# Altium footprint library 2019-09-13_04-08-47.PcbLib: 3 footprints
Each footprint in its own frame and in the unit in brackets; x right, y up, seen from the top. Pads: shape width x height; smd on the part's side, far side on the other; paste and mask are expansions set on the pad; w line width, h text height; cw(c..) or ccw(c..) is an arc to the next point about the centre after c.
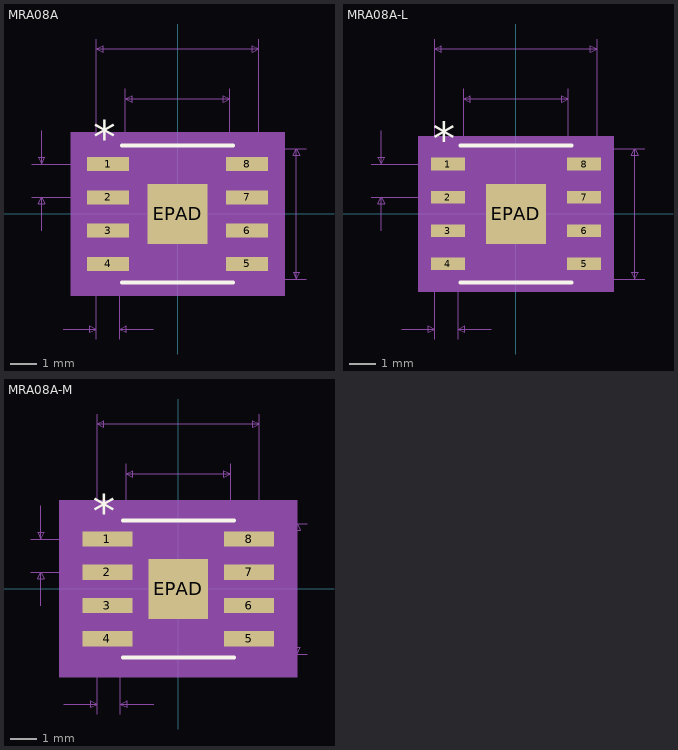
[diagram p0: the footprints below, top view; thin cyan lines are the x and y axes]

## MRA08A [mil]
pads (9):
  rect 63x21 smd paste+0 mask+0: 1(-104.5,75) 2(-104.5,25) 3(-104.5,-25) 4(-104.5,-75) 5(104.5,-75) 6(104.5,-25) 7(104.5,25) 8(104.5,75)
  rect 90x90 smd paste-44.5 mask+0: EPAD(0,0)
Top Overlay:
  lines w6: -83.5,-103 83.5,-103 ; -83.5,103 83.5,103
  text "*" at -127,91 h50
Top Paste:
  region: 45,45 -45,45 -45,-45 45,-45
Mechanical 5:
  region: 161,-123 -161,-123 -161,123 161,123
Mechanical 7:
  lines w1: -219.5,25 -104.5,25 ; -219.5,75 -104.5,75 ; -204.5,-25 -204.5,25 ; -204.5,125 -204.5,75 ; -172,-173 -122,-173 ; -122,-188 -122,0 -122,263 ; -87,-188 -87,0 ; -78.5,0 -78.5,188 ; -37,-173 -87,-173 ; 0,-98 193.5,-98 ; 0,98 193.5,98 ; 78.5,0 78.5,188 ; 122,0 122,263 ; -204.5,25 -199.5,15 -209.5,15 -204.5,25 ; -204.5,75 -199.5,85 -209.5,85 -204.5,75 ; -122,-173 -132,-178 -132,-168 -122,-173 ; -122,248 -112,243 -112,253 -122,248 ; -122,248 122,248 ; -87,-173 -77,-178 -77,-168 -87,-173 ; -78.5,173 -68.5,168 -68.5,178 -78.5,173 ; -78.5,173 78.5,173 ; 78.5,173 68.5,168 68.5,178 78.5,173 ; 122,248 112,243 112,253 122,248 ; 178.5,-98 183.5,-88 173.5,-88 178.5,-98 ; 178.5,-98 178.5,98 ; 178.5,98 183.5,88 173.5,88 178.5,98
  text "0.035in/0.889mm" at -198.25,-218 h25
  text "0.05in/1.27mm" at -387,37.5 h25
  text "0.196in/4.978mm" at 198.5,-12.5 h25
  text "0.244in/6.198mm" at -93.75,268 h25
  text "0.157in/3.988mm" at -93.75,193 h25
  text "Alt 2 Padstyle: OX90Y60D30P" at -337.5,-598 h50
  text "Alt 1 Padstyle: OX60Y90D30P" at -337.5,-538 h50
  text "Heat Tab Padstyle: RX90Y90D0T" at -362.5,-418 h50
  text "Pin One Padstyle: RX63Y21D0T" at -350,-358 h50
  text "Default Padstyle: RX63Y21D0T" at -350,-298 h50
Mechanical 13:
  lines w0: -12,98 ccw(c0,98) 12,98
  lines w1: -122,-84.5 -78.5,-84.5 -78.5,-65.5 -122,-65.5 -122,-84.5 ; -122,-34.5 -78.5,-34.5 -78.5,-15.5 -122,-15.5 -122,-34.5 ; -122,15.5 -78.5,15.5 -78.5,34.5 -122,34.5 -122,15.5 ; -122,65.5 -78.5,65.5 -78.5,84.5 -122,84.5 -122,65.5 ; -78.5,-98 -78.5,98 78.5,98 78.5,-98 -78.5,-98 ; 78.5,-84.5 122,-84.5 122,-65.5 78.5,-65.5 78.5,-84.5 ; 78.5,-34.5 122,-34.5 122,-15.5 78.5,-15.5 78.5,-34.5 ; 78.5,15.5 122,15.5 122,34.5 78.5,34.5 78.5,15.5 ; 78.5,65.5 122,65.5 122,84.5 78.5,84.5 78.5,65.5
  text "*" at -76,45 h50
Mechanical 15:
  region: -88.5,-95.5 -146,-95.5 -146,95.5 -88.5,95.5 -88.5,108 88.5,108 88.5,95.5 146,95.5 146,-95.5 88.5,-95.5 88.5,-108 -88.5,-108
  lines w6: -146,-95.5 -88.5,-95.5 -88.5,-108 88.5,-108 88.5,-95.5 146,-95.5 146,95.5 88.5,95.5 88.5,108 -88.5,108 -88.5,95.5 -146,95.5 -146,-95.5
3D body: height 10, standoff 0, extent 0,0 10,10

## MRA08A-L [mil]
pads (9):
  rect 51x19 smd paste+0 mask+0: 1(-102.5,75) 2(-102.5,25) 3(-102.5,-25) 4(-102.5,-75) 5(102.5,-75) 6(102.5,-25) 7(102.5,25) 8(102.5,75)
  rect 90x90 smd paste-44.5 mask+0: EPAD(0,0)
Top Overlay:
  lines w6: -83.5,-103 83.5,-103 ; -83.5,103 83.5,103
  text "*" at -125,89 h50
Top Paste:
  region: 45,45 -45,45 -45,-45 45,-45
Mechanical 5:
  region: 147,-117 -147,-117 -147,117 147,117
Mechanical 7:
  lines w1: -217.5,25 -102.5,25 ; -217.5,75 -102.5,75 ; -202.5,-25 -202.5,25 ; -202.5,125 -202.5,75 ; -172,-173 -122,-173 ; -122,-188 -122,0 -122,263 ; -87,-188 -87,0 ; -78.5,0 -78.5,188 ; -37,-173 -87,-173 ; 0,-98 193.5,-98 ; 0,98 193.5,98 ; 78.5,0 78.5,188 ; 122,0 122,263 ; -202.5,25 -197.5,15 -207.5,15 -202.5,25 ; -202.5,75 -197.5,85 -207.5,85 -202.5,75 ; -122,-173 -132,-178 -132,-168 -122,-173 ; -122,248 -112,243 -112,253 -122,248 ; -122,248 122,248 ; -87,-173 -77,-178 -77,-168 -87,-173 ; -78.5,173 -68.5,168 -68.5,178 -78.5,173 ; -78.5,173 78.5,173 ; 78.5,173 68.5,168 68.5,178 78.5,173 ; 122,248 112,243 112,253 122,248 ; 178.5,-98 183.5,-88 173.5,-88 178.5,-98 ; 178.5,-98 178.5,98 ; 178.5,98 183.5,88 173.5,88 178.5,98
  text "0.035in/0.889mm" at -198.25,-218 h25
  text "0.05in/1.27mm" at -385,37.5 h25
  text "0.196in/4.978mm" at 198.5,-12.5 h25
  text "0.244in/6.198mm" at -93.75,268 h25
  text "0.157in/3.988mm" at -93.75,193 h25
  text "Alt 2 Padstyle: OX90Y60D30P" at -337.5,-598 h50
  text "Alt 1 Padstyle: OX60Y90D30P" at -337.5,-538 h50
  text "Heat Tab Padstyle: RX90Y90D0T" at -362.5,-418 h50
  text "Pin One Padstyle: RX51Y19D0T" at -350,-358 h50
  text "Default Padstyle: RX51Y19D0T" at -350,-298 h50
Mechanical 13:
  lines w0: -12,98 ccw(c0,98) 12,98
  lines w1: -122,-84.5 -78.5,-84.5 -78.5,-65.5 -122,-65.5 -122,-84.5 ; -122,-34.5 -78.5,-34.5 -78.5,-15.5 -122,-15.5 -122,-34.5 ; -122,15.5 -78.5,15.5 -78.5,34.5 -122,34.5 -122,15.5 ; -122,65.5 -78.5,65.5 -78.5,84.5 -122,84.5 -122,65.5 ; -78.5,-98 -78.5,98 78.5,98 78.5,-98 -78.5,-98 ; 78.5,-84.5 122,-84.5 122,-65.5 78.5,-65.5 78.5,-84.5 ; 78.5,-34.5 122,-34.5 122,-15.5 78.5,-15.5 78.5,-34.5 ; 78.5,15.5 122,15.5 122,34.5 78.5,34.5 78.5,15.5 ; 78.5,65.5 122,65.5 122,84.5 78.5,84.5 78.5,65.5
  text "*" at -76,45 h50
Mechanical 15:
  region: -82.5,-88.5 -132,-88.5 -132,88.5 -82.5,88.5 -82.5,102 82.5,102 82.5,88.5 132,88.5 132,-88.5 82.5,-88.5 82.5,-102 -82.5,-102
  lines w6: -132,-88.5 -82.5,-88.5 -82.5,-102 82.5,-102 82.5,-88.5 132,-88.5 132,88.5 82.5,88.5 82.5,102 -82.5,102 -82.5,88.5 -132,88.5 -132,-88.5
3D body: height 10, standoff 0, extent 0,0 10,10

## MRA08A-M [mil]
pads (9):
  rect 75x23 smd paste+0 mask+0: 1(-106.5,75) 2(-106.5,25) 3(-106.5,-25) 4(-106.5,-75) 5(106.5,-75) 6(106.5,-25) 7(106.5,25) 8(106.5,75)
  rect 90x90 smd paste-44.5 mask+0: EPAD(0,0)
Top Overlay:
  lines w6: -83.5,-103 83.5,-103 ; -83.5,103 83.5,103
  text "*" at -129,93 h50
Top Paste:
  region: 45,45 -45,45 -45,-45 45,-45
Mechanical 5:
  region: 179,-133 -179,-133 -179,133 179,133
Mechanical 7:
  lines w1: -221.5,25 -106.5,25 ; -221.5,75 -106.5,75 ; -206.5,-25 -206.5,25 ; -206.5,125 -206.5,75 ; -172,-173 -122,-173 ; -122,-188 -122,0 -122,263 ; -87,-188 -87,0 ; -78.5,0 -78.5,188 ; -37,-173 -87,-173 ; 0,-98 193.5,-98 ; 0,98 193.5,98 ; 78.5,0 78.5,188 ; 122,0 122,263 ; -206.5,25 -201.5,15 -211.5,15 -206.5,25 ; -206.5,75 -201.5,85 -211.5,85 -206.5,75 ; -122,-173 -132,-178 -132,-168 -122,-173 ; -122,248 -112,243 -112,253 -122,248 ; -122,248 122,248 ; -87,-173 -77,-178 -77,-168 -87,-173 ; -78.5,173 -68.5,168 -68.5,178 -78.5,173 ; -78.5,173 78.5,173 ; 78.5,173 68.5,168 68.5,178 78.5,173 ; 122,248 112,243 112,253 122,248 ; 178.5,-98 183.5,-88 173.5,-88 178.5,-98 ; 178.5,-98 178.5,98 ; 178.5,98 183.5,88 173.5,88 178.5,98
  text "0.035in/0.889mm" at -198.25,-218 h25
  text "0.05in/1.27mm" at -389,37.5 h25
  text "0.196in/4.978mm" at 198.5,-12.5 h25
  text "0.244in/6.198mm" at -93.75,268 h25
  text "0.157in/3.988mm" at -93.75,193 h25
  text "Alt 2 Padstyle: OX90Y60D30P" at -337.5,-598 h50
  text "Alt 1 Padstyle: OX60Y90D30P" at -337.5,-538 h50
  text "Heat Tab Padstyle: RX90Y90D0T" at -362.5,-418 h50
  text "Pin One Padstyle: RX75Y23D0T" at -350,-358 h50
  text "Default Padstyle: RX75Y23D0T" at -350,-298 h50
Mechanical 13:
  lines w0: -12,98 ccw(c0,98) 12,98
  lines w1: -122,-84.5 -78.5,-84.5 -78.5,-65.5 -122,-65.5 -122,-84.5 ; -122,-34.5 -78.5,-34.5 -78.5,-15.5 -122,-15.5 -122,-34.5 ; -122,15.5 -78.5,15.5 -78.5,34.5 -122,34.5 -122,15.5 ; -122,65.5 -78.5,65.5 -78.5,84.5 -122,84.5 -122,65.5 ; -78.5,-98 -78.5,98 78.5,98 78.5,-98 -78.5,-98 ; 78.5,-84.5 122,-84.5 122,-65.5 78.5,-65.5 78.5,-84.5 ; 78.5,-34.5 122,-34.5 122,-15.5 78.5,-15.5 78.5,-34.5 ; 78.5,15.5 122,15.5 122,34.5 78.5,34.5 78.5,15.5 ; 78.5,65.5 122,65.5 122,84.5 78.5,84.5 78.5,65.5
  text "*" at -76,45 h50
Mechanical 15:
  region: -98.5,-106.5 -164,-106.5 -164,106.5 -98.5,106.5 -98.5,118 98.5,118 98.5,106.5 164,106.5 164,-106.5 98.5,-106.5 98.5,-118 -98.5,-118
  lines w6: -164,-106.5 -98.5,-106.5 -98.5,-118 98.5,-118 98.5,-106.5 164,-106.5 164,106.5 98.5,106.5 98.5,118 -98.5,118 -98.5,106.5 -164,106.5 -164,-106.5
3D body: height 10, standoff 0, extent 0,0 10,10